# Altium schematic symbol library Protection.SchLib: 7 symbols
Pins are listed as number, name and electrical type; pins without a type are passive.

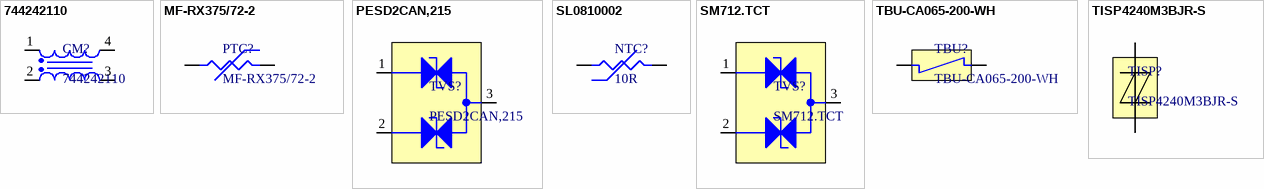
[diagram p0: symbols 744242110 to TISP4240M3BJR-S]

## 744242110
designator CM?
Data Line Filter, 2 Function(s), 80V, 0.3A, 4 Pin(s); Manufacturer: Wurth Electronics; Purpose Of Usage: BASIC; Manufacturer Part Number: 744242110; RoHS: YES; Category: PROTECTION; Local Supplier: Wurth Electronics; Mount: SMD; Stock ID: ??; Sub-Category: FILTER-COMMON MODE; Supplier 1: Digikey; Supplier Part Number 1: 732-1681-1-ND
footprint WE-SLM_L6W3.3H3.3 (SMD Inductor, 4-Leads, Body 5x3.3mm)
pins: 1, 2, 3, 4

## MF-RX375/72-2
designator PTC?
PTC Resettable Fuse 3.75A(hold) 7.5A(trip) 72V 40A 3.2W 24s 0.03Ohm Radial 23.51 X 3.1 X 29.51mm T/R; Manufacturer: Bourns; Approvals: UL; Lead Diameter: 810µm; Value: 30mΩ; Purpose Of Usage: BASIC; Manufacturer Part Number: MF-RX375/72-2; RoHS: YES; Category: PROTECTION; Case/Package: Radial; China RoHS: Compliant; Height: 29.51mm; Hold Current: 3.75A; Lead Pitch: 10.2mm; Lifecycle Status: Production; Max Current Rating: 40A; Max Operating Temperature: 85°C; Min Operating Temperature: -40°C; Mounting Technology: Through Hole; Number of Terminals: 2; Packaging: Tape and Reel; Power Dissipation: 3.2W; Working Voltage: 72V; Local Supplier: OZDISAN; Mount: THT; Sub-Category: RESETABLE-FUSE-PTC; Supplier 1: Digikey; Supplier Part Number 1: 118-MF-RX375/72-2TR-ND
footprint MF-RX375/72-2
pins: 1, 2

## PESD2CAN,215
designator TVS?
PESD Series 2 Channel Bi-Directional CAN Bus ESD Protection Diode - SOT-23; Manufacturer: Nexperia USA; Purpose Of Usage: BASIC; Direction: Bidirectional; Manufacturer Part Number: PESD2CAN,215; RoHS: No; Category: PROTECTION; Case/Package: SOT-23; Local Supplier: GENERAL; Mount: SMD; Stock ID: ??; Sub-Category: TVS - BI DIRECTIONAL; Supplier Part Number 1: 1727-3891-2-ND; Supplier 1: Digikey
footprint WE-TVS_SOT23-3L (TVS Diode, package SOT23-3L)
pins: 1 I/O 1, 2 I/O 2, 3 GND

## SL0810002
designator NTC?, comment 10R
8mm, 10R, NTC; Manufacturer: Vishay Ametherm; Manufacturer Part Number: SL0810002; Purpose Of Usage: BASIC; Case/Package: custom; Category: PROTECTION; Local Supplier: GENERAL; Max Operating Temperature: 125°C; Min Operating Temperature: -55°C; Mount: THT; RoHS: YES; Stock ID: ??; Sub-Category: NTC; Supplier 1: Digikey; Supplier Part Number 1: 570-SL0810002-ND
footprint 8mm NTC
pins: 1, 2

## SM712.TCT
designator TVS?
SM Series 12 V 400 W Asymmetrical TVS Diode for Extended Common-Mode - SOT-23; Manufacturer: Semtech; Direction: Bidirectional; Number of Elements: 2; Min Breakdown Voltage: 7.5V; Clamping Voltage: 26V; Peak Pulse Power: 400W; Leakage Current: 1uA; Peak Pulse Current: 17A; Working Voltage: 12V; Max Breakdown Voltage: 13.3V; ESD Protection: Yes; Max Reverse Leakage Current: 20uA; Number of Channels: 2NUMBER; Purpose Of Usage: BASIC; Manufacturer Part Number: SM712.TCT; RoHS: YES; Category: PROTECTION; Mounting Technology: Surface Mount; Case/Package: SOT-23; Pins: 3; Min Operating Temperature: -55°C; Max Operating Temperature: 125°C; Number of Bidirectional Channels: 2; Power Dissipation: 400W; Polarity: Bidirectional; Max Power Dissipation: 400W; Breakdown Voltage: 13.3V; Voltage Rating (DC): 12V; Clamping Voltage-Max: 12V; Length: 2.9mm; Lead Free: Lead Free; Local Supplier: GENERAL; Mount: SMD; Power Rating: 400W; Price 10K: 0.5; Stock ID: ??; Sub-Category: TVS - BI DIRECTIONAL; Supplier 1: Digikey; Supplier Part Number 1: SM712CT-ND
footprint WE-TVS_SOT23-3L (TVS Diode, package SOT23-3L)
pins: 1 I/O 1, 2 I/O 2, 3 GND

## TBU-CA065-200-WH
designator TBU?
A Single Bi-Directional, 650V, 200mA, 3-Pin DFN pkg TBU | Bourns TBU-CA065-200-WH; Direction: Bidirectional; ESD Protection: Yes; Max Junction Temperature (Tj): 125°C; Number of Circuits: 2; Number of Elements: 1; Peak Pulse Current: 400mA; Value: 8.6Ω; Voltage Rating: 300V; Purpose Of Usage: BASIC; Manufacturer: Bourns; Manufacturer Part Number: TBU-CA065-200-WH; RoHS: YES; Category: PROTECTION; Case/Package: DFN; China RoHS: Compliant; Clamping Voltage: 650V; Current Rating: 200mA; Element Configuration: Single; Height: 1mm; Length: 6.5mm; Lifecycle Status: Production; Max Operating Temperature: 125°C; Manufacturer Package Identifier: TBU-CA065-200-WH; Min Operating Temperature: -55°C; Mounting Technology: Surface Mount; Pins: 12; Number of Terminals: 3; Voltage Rating (DC): 650V; Working Voltage: 300V; Local Supplier: GENERAL; Mount: SMD; Stock ID: ??; Sub-Category: TBU; Supplier 1: Digikey; Supplier Part Number 1: TBU-CA065-200-WHTR-ND
footprint TBU-CA065-200-WH (Chip Resistor, 2-Leads, Body 1.00x0.50mm, IPC Medium Density)
pins: 1, 2

## TISP4240M3BJR-S
designator TISP?
TVS Thyristor, Bidirectional, 2 Pins, DO-214AA (SMB), Overvoltage Protector, 240 V, 1 Circuit; Manufacturer: Bourns; Breakdown Voltage: 240V; Value: 50pF; Current Rating: 5A; Forward Voltage: 3V; Hold Current: 350mA; Max Junction Temperature (Tj): 150°C; Number of Circuits: 1; Peak Pulse Current: 220A; Purpose Of Usage: BASIC; Manufacturer Part Number: TISP4240M3BJR-S; RoHS: YES; Category: PROTECTION; Case/Package: SMB; China RoHS: Non-Compliant; Export Control Classification Number (ECCN) Code: EAR99; Height: 2.4mm; Harmonized Tariff Schedule (HTS) Code: 8541.30.00.80; Introduction Date: 2005-05-05; Lifecycle Status: Production; Max Operating Temperature: 150°C; Min Operating Temperature: -40°C; Mounting Technology: Surface Mount; Number of Elements: 1; Pins: 2; Number of Terminals: 2; Local Supplier: GENERAL; Mount: SMD; Stock ID: ??; Sub-Category: TISP; Supplier 1: Digikey; Supplier Part Number 1: TISP4240M3BJR-S
footprint SMB/DO-214AA
pins: 1, 2